# Altium footprint library QFN-32-1EP_5x5mm_P0.5mm_EP3.45x3.45mm.PcbLib: 1 footprints
Each footprint in its own frame and in the unit in brackets; x right, y up, seen from the top. Pads: shape width x height; smd on the part's side, far side on the other; paste and mask are expansions set on the pad; w line width, h text height; cw(c..) or ccw(c..) is an arc to the next point about the centre after c.
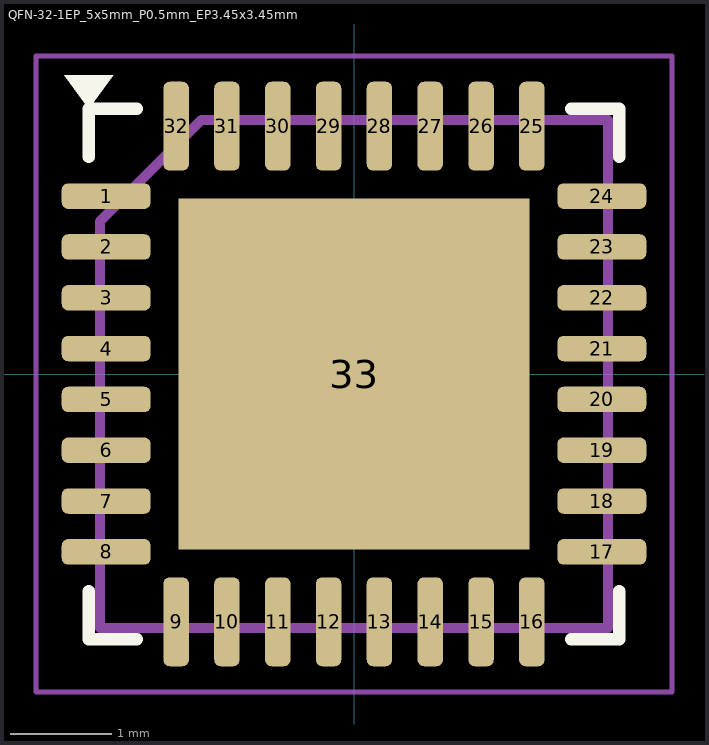
[diagram p0: the footprint, top view; thin cyan lines are the x and y axes]

## QFN-32-1EP_5x5mm_P0.5mm_EP3.45x3.45mm [mm] "QFN-32 5x5 mm, 0.5 mm pitch, exposed pad (LTC 05-08-1693 style); IPC-7351B qfn density B; generated by ecadlib"
height 0.8
pads (33):
  rrect50% 0.875x0.25 smd: 1(-2.438,1.75) 2(-2.438,1.25) 3(-2.438,0.75) 4(-2.438,0.25) 5(-2.438,-0.25) 6(-2.438,-0.75) 7(-2.438,-1.25) 8(-2.438,-1.75) 17(2.438,-1.75) 18(2.438,-1.25) 19(2.438,-0.75) 20(2.438,-0.25) 21(2.438,0.25) 22(2.438,0.75) 23(2.438,1.25) 24(2.438,1.75)
  rrect50% 0.25x0.875 smd: 9(-1.75,-2.438) 10(-1.25,-2.438) 11(-0.75,-2.438) 12(-0.25,-2.438) 13(0.25,-2.438) 14(0.75,-2.438) 15(1.25,-2.438) 16(1.75,-2.438) 25(1.75,2.438) 26(1.25,2.438) 27(0.75,2.438) 28(0.25,2.438) 29(-0.25,2.438) 30(-0.75,2.438) 31(-1.25,2.438) 32(-1.75,2.438)
  rect 3.45x3.45 smd paste-1.735: 33(0,0)
Top Overlay:
  region: -2.61,2.61 -2.85,2.94 -2.37,2.94
  lines w0.12: -2.61,-2.135 -2.61,-2.61 -2.135,-2.61 ; -2.61,2.135 -2.61,2.61 -2.135,2.61 ; 2.135,-2.61 2.61,-2.61 2.61,-2.135 ; 2.135,2.61 2.61,2.61 2.61,2.135
  text ".Designator" at -1.391,3.33 h1
Top Paste:
  rectangle: -1.596,0.704 -0.704,1.596
  rectangle: -1.596,-0.446 -0.704,0.446
  rectangle: -1.596,-1.596 -0.704,-0.704
  rectangle: -0.446,0.704 0.446,1.596
  rectangle: -0.446,-0.446 0.446,0.446
  rectangle: -0.446,-1.596 0.446,-0.704
  rectangle: 0.704,0.704 1.596,1.596
  rectangle: 0.704,-0.446 1.596,0.446
  rectangle: 0.704,-1.596 1.596,-0.704
Mechanical 13:
  lines w0.1: -2.5,-2.5 2.5,-2.5 2.5,2.5 -1.5,2.5 -2.5,1.5 -2.5,-2.5
  text ".Comment" at -3.708,-4.33 h1
Mechanical 15:
  lines w0.05: -3.13,-3.13 3.13,-3.13 3.13,3.13 -3.13,3.13 -3.13,-3.13